# Altium schematic symbol library C94904.SchLib: 1 symbol
Pins are listed as number, name and electrical type; pins without a type are passive.

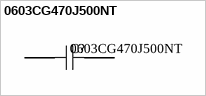
[diagram p0: symbol 0603CG470J500NT]

## 0603CG470J500NT
designator C?
47pF ±5% 50V Ceramic Capacitor C0G 0603; Name: C94904; Source: LCSC; Value: 47pF
footprint C0603 (47pF ±5% 50V Ceramic Capacitor C0G 0603)
pins: 1, 2